# Altium footprint library Water Tank Telemeter.PcbLib: 45 footprints (part 2 of 3)
Each footprint in its own frame and in the unit in brackets; x right, y up, seen from the top. Pads: shape width x height; smd on the part's side, far side on the other; paste and mask are expansions set on the pad; w line width, h text height; cw(c..) or ccw(c..) is an arc to the next point about the centre after c.
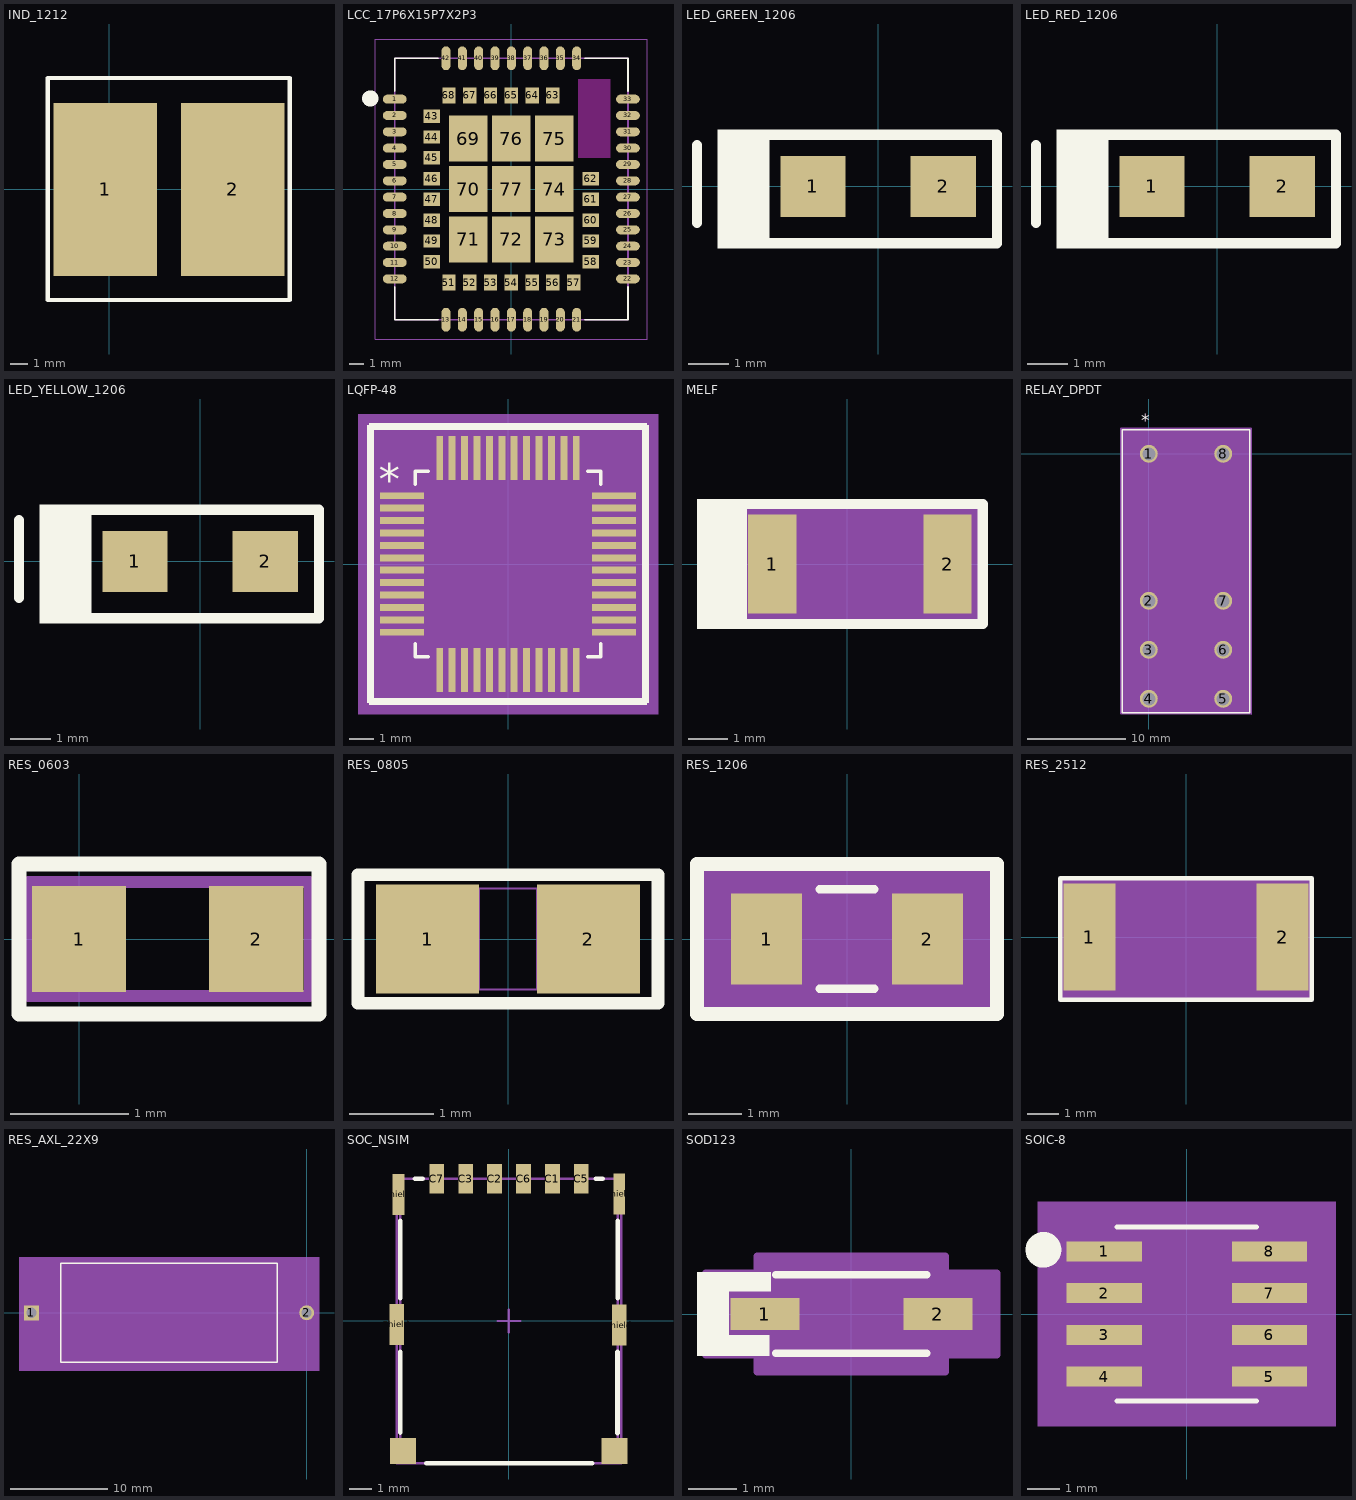
[diagram p1: the footprints below, top view; thin cyan lines are the x and y axes]

## IND_1212 [mm]
pads (2):
  rect 6x10 smd: 1(-0.229,0) 2(7.137,0)
Top Overlay:
  lines w0.254: -3.556,-6.401 10.439,-6.401 10.439,6.452 -3.556,6.452 -3.556,-6.401
3D body "69079.stp": height 7.5, standoff 0, extent -2.719,-6.25 9.781,6.25

## LCC_17P6X15P7X2P3 [mm]
pads (77):
  oval 1.6x0.6 smd: 1(-7.85,6.05) 2(-7.85,4.95) 3(-7.85,3.85) 4(-7.85,2.75) 5(-7.85,1.65) 6(-7.85,0.55) 7(-7.85,-0.55) 8(-7.85,-1.65) 9(-7.85,-2.75) 10(-7.85,-3.85) 11(-7.85,-4.95) 12(-7.85,-6.05) 22(7.85,-6.05) 23(7.85,-4.95) 24(7.85,-3.85) 25(7.85,-2.75) 26(7.85,-1.65) 27(7.85,-0.55) 28(7.85,0.55) 29(7.85,1.65) 30(7.85,2.75) 31(7.85,3.85) 32(7.85,4.95) 33(7.85,6.05)
  oval 0.6x1.6 smd: 13(-4.4,-8.8) 14(-3.3,-8.8) 15(-2.2,-8.8) 16(-1.1,-8.8) 17(0,-8.8) 18(1.1,-8.8) 19(2.2,-8.8) 20(3.3,-8.8) 21(4.4,-8.8) 34(4.4,8.8) 35(3.3,8.8) 36(2.2,8.8) 37(1.1,8.8) 38(0,8.8) 39(-1.1,8.8) 40(-2.2,8.8) 41(-3.3,8.8) 42(-4.4,8.8)
  rect 1.1x0.9 smd: 43(-5.35,4.9) 44(-5.35,3.5) 45(-5.35,2.1) 46(-5.35,0.7) 47(-5.35,-0.7) 48(-5.35,-2.1) 49(-5.35,-3.5) 50(-5.35,-4.9) 58(5.35,-4.9) 59(5.35,-3.5) 60(5.35,-2.1) 61(5.35,-0.7) 62(5.35,0.7)
  rect 0.9x1.1 smd: 51(-4.2,-6.3) 52(-2.8,-6.3) 53(-1.4,-6.3) 54(0,-6.3) 55(1.4,-6.3) 56(2.8,-6.3) 57(4.2,-6.3) 63(2.8,6.3) 64(1.4,6.3) 65(0,6.3) 66(-1.4,6.3) 67(-2.8,6.3) 68(-4.2,6.3)
  rect 2.6x3.1 smd: 69(-2.9,3.4) 70(-2.9,0) 71(-2.9,-3.4) 72(0,-3.4) 73(2.9,-3.4) 74(2.9,0) 75(2.9,3.4) 76(0,3.4) 77(0,0)
Top Overlay:
  circle w0.889: c-9.5,6.1 r0.1
  lines w0.127: -7.85,-6.6 -7.85,-8.8 -4.95,-8.8 ; -7.85,6.6 -7.85,8.8 -4.95,8.8 ; 4.95,-8.8 7.85,-8.8 7.85,-6.6 ; 4.95,8.8 7.85,8.8 7.85,6.6
Top Paste:
  drawing of 140 lines, arcs and shapes, not listed
Keep-Out Layer:
  region: 4.508,7.4 6.65,7.4 6.65,2.104 4.508,2.104
  region: 4.504,7.4 6.65,7.4 6.65,2.102 4.504,2.102
  region: 4.502,7.4 6.65,7.4 6.65,2.101 4.502,2.101
  region: 4.508,7.4 6.65,7.4 6.65,2.104 4.508,2.104
  region: 4.504,7.4 6.65,7.4 6.65,2.102 4.504,2.102
  region: 4.502,7.4 6.65,7.4 6.65,2.101 4.502,2.101
  region: 4.508,7.4 6.65,7.4 6.65,2.104 4.508,2.104
  region: 4.504,7.4 6.65,7.4 6.65,2.102 4.504,2.102
  region: 4.502,7.4 6.65,7.4 6.65,2.101 4.502,2.101
Mechanical 13:
  lines w0.127: -7.85,-8.8 -7.85,8.8 ; -7.85,-8.8 7.85,-8.8 ; -7.85,-8.8 -7.85,8.8 ; -7.85,-8.8 7.85,-8.8 ; -7.85,8.8 7.85,8.8 ; -7.85,8.8 7.85,8.8 ; 7.85,-8.8 7.85,8.8 ; 7.85,-8.8 7.85,8.8
Mechanical 15:
  lines w0.05: -9.15,-10.1 -9.15,10.1 9.15,10.1 9.15,-10.1 -9.15,-10.1
3D body "User Library-SIM868.STEP": height 2.6, standoff 0, extent -7.825,-8.786 7.875,8.814

## LED_GREEN_1206 [mm]
pads (2):
  rect 1.6x1.5 smd: 1(-1.6,0) 2(1.6,0)
Top Overlay:
  rectangle: -3.937,-1.524 -2.667,1.397
  lines w0.254: -4.445,-0.889 -4.445,1.016 ; -3.048,-1.397 -3.048,-1.142 -3.048,1.27 2.921,1.27 2.921,-1.397 -3.048,-1.397
3D body "User Library-GREEN-led_1206.STEP": height 1.1, standoff 0, extent -1.61,-0.8 1.61,0.8

## LED_RED_1206 [mm]
pads (2):
  rect 1.6x1.5 smd: 1(-1.6,0) 2(1.6,0)
Top Overlay:
  rectangle: -3.937,-1.524 -2.667,1.397
  lines w0.254: -4.445,-0.889 -4.445,1.016 ; -3.048,-1.397 2.921,-1.397 2.921,1.27 -3.048,1.27 -3.048,-1.142 -3.048,-1.397
3D body "User Library-RED-led_1206.STEP": height 1.1, standoff 0, extent -1.61,-0.8 1.61,0.8

## LED_YELLOW_1206 [mm]
pads (2):
  rect 1.6x1.5 smd: 1(-1.6,0) 2(1.6,0)
Top Overlay:
  rectangle: -3.937,-1.524 -2.667,1.397
  lines w0.254: -4.445,-0.889 -4.445,1.016 ; -3.048,-1.397 -3.048,-1.142 -3.048,1.27 2.921,1.27 2.921,-1.397 -3.048,-1.397
3D body "User Library-led-YELLOW_1206.STEP": height 1.1, standoff 0, extent -1.61,-0.8 1.61,0.8

## LQFP-48 [mil]
pads (48):
  rect 70x11 smd paste+0 mask+0: 1(-168,108.27) 2(-168,88.58) 3(-168,68.9) 4(-168,49.21) 5(-168,29.53) 6(-168,9.84) 7(-168,-9.84) 8(-168,-29.53) 9(-168,-49.21) 10(-168,-68.9) 11(-168,-88.58) 12(-168,-108.27) 25(168,-108.27) 26(168,-88.58) 27(168,-68.9) 28(168,-49.21) 29(168,-29.53) 30(168,-9.84) 31(168,9.84) 32(168,29.53) 33(168,49.21) 34(168,68.9) 35(168,88.58) 36(168,108.27)
  rect 11x70 smd paste+0 mask+0: 13(-108.27,-168) 14(-88.58,-168) 15(-68.9,-168) 16(-49.21,-168) 17(-29.53,-168) 18(-9.84,-168) 19(9.84,-168) 20(29.53,-168) 21(49.21,-168) 22(68.9,-168) 23(88.58,-168) 24(108.27,-168) 37(108.27,168) 38(88.58,168) 39(68.9,168) 40(49.21,168) 41(29.53,168) 42(9.84,168) 43(-9.84,168) 44(-29.53,168) 45(-49.21,168) 46(-68.9,168) 47(-88.58,168) 48(-108.27,168)
Top Overlay:
  region: 220,213 -220,213 -220,223 220,223
  region: 213,220 223,220 223,-220 213,-220
  region: 220,-213 -220,-213 -220,-223 220,-223
  region: -213,220 -223,220 -223,-220 -213,-220
  lines w6: -147,-126.87 -147,-147 -126.87,-147 ; -147,126.87 -147,147 -126.87,147 ; 126.87,-147 147,-147 147,-126.87 ; 126.87,147 147,147 147,126.87
  text "*" at -205,110 h50
Mechanical 5:
  region: 238,-238 -238,-238 -238,238 238,238
Mechanical 13:
  drawing of 197 lines, arcs and shapes, not listed
  text "*" at -139.5,93.11 h50
Mechanical 15:
  region: -133.77,-162 -162,-162 -162,-133.77 -223,-133.77 -223,133.77 -162,133.77 -162,162 -133.77,162 -133.77,223 133.77,223 133.77,162 162,162 162,133.77 223,133.77 223,-133.77 162,-133.77 162,-162 133.77,-162 133.77,-223 -133.77,-223
  lines w6: -223,-133.77 -223,133.77 -162,133.77 -162,162 -133.77,162 -133.77,223 133.77,223 133.77,162 162,162 162,133.77 223,133.77 223,-133.77 162,-133.77 162,-162 133.77,-162 133.77,-223 -133.77,-223 -133.77,-162 -162,-162 -162,-133.77 -223,-133.77
3D body "User Library-LQFP50P900X900X160.STEP": height 62.99, standoff 0, extent -177.17,-177.16 177.16,177.16
3D body: height 10, standoff 0, extent 0,0 10,10

## MELF [mm]
pads (2):
  rect 1.219x2.5 smd paste+0 mask+0: 1(-1.903,0) 2(2.54,0)
Top Overlay:
  rectangle: -3.81,-1.651 -2.667,1.651
  lines w0.254: -2.667,-1.524 -2.667,1.524 3.429,1.524 3.429,-1.524 -2.667,-1.524
Mechanical 5:
  region: 3.357,-1.397 -2.595,-1.397 -2.595,1.397 3.357,1.397
Mechanical 15:
  region: 3.302,-1.397 -2.54,-1.397 -2.54,1.397 3.302,1.397
3D body "User Library-MELF.STEP": height 2.47, standoff -0.03, extent -2.195,-1.25 2.805,1.25
3D body: height 0.25, standoff 0, extent 0,0 0.254,0.254

## RELAY_DPDT [mil]
pads (8):
  round 72 hole 52 mask+0: 1(0,0) 2(0,-591) 3(0,-788) 4(0,-985) 5(299,-985) 6(299,-788) 7(299,-591) 8(299,0)
Top Overlay:
  lines w6: -107.5,-1041 406.5,-1041 406.5,97 -107.5,97 -107.5,-1041
  text "*" at -30,110 h50
Mechanical 5:
  region: 410,-1040 -110,-1040 -110,100 410,100
Mechanical 13:
  lines w0: 137.5,92 ccw(c149.5,92) 161.5,92
  lines w1: -102.5,-1036 401.5,-1036 401.5,92 -102.5,92 -102.5,-1036
Mechanical 15:
  region: 411.5,-1046 -112.5,-1046 -112.5,102 411.5,102
  region: 401.5,-1036 -102.5,-1036 -102.5,92 401.5,92
  lines w6: -112.5,-1046 -112.5,102 411.5,102 411.5,-1046 -112.5,-1046
3D body "RELAY_JW2_PAN.step": height 787.09, standoff -100, extent -97.52,-1030.98 406.5,97.01
3D body: height 10, standoff 0, extent 0,0 10,10

## RES_0603 [mm]
pads (2):
  rect 0.8x0.9 smd: 1(0,0) 2(1.5,0)
Top Overlay:
  lines w0.127: -0.508,-0.635 -0.508,0.635 2.032,0.635 2.032,-0.635 -0.508,-0.635
Mechanical 13:
  lines w0.1: -0.432,-0.483 1.956,-0.483 1.956,0.483 -0.432,0.483 -0.432,-0.483
Mechanical 15:
  lines w0.05: -0.432,-0.483 1.93,-0.483 1.93,0.483 -0.432,0.483 -0.432,-0.483
3D body "CircuitWorks-RESISTOR 0603.STEP": height 0.48, standoff -0.03, extent -0.063,-0.43 1.537,0.43

## RES_0805 [mil]
pads (2):
  rect 48x51 smd paste+0 mask+0: 1(-37.5,0) 2(37.5,0)
Top Overlay:
  lines w6: -70,-30 -70,30 70,30 70,-30 -70,-30
Mechanical 13:
  lines w1: -39.5,-23.5 -39.5,23.5 ; -39.5,-23.5 39.5,-23.5 ; -39.5,-23.5 -13.5,-23.5 -13.5,23.5 -39.5,23.5 ; -39.5,-23.5 -39.5,23.5 ; -39.5,23.5 39.5,23.5 ; 39.5,-23.5 39.5,23.5 ; 39.5,-23.5 39.5,23.5 ; 39.5,-23.5 13.5,-23.5 13.5,23.5 39.5,23.5
3D body "User Library-RES0805-2.STEP": height 21.65, standoff 0, extent -39.37,-24.61 39.37,24.6
3D body: height 10, standoff 0, extent 0,0 10,10

## RES_1206 [mil]
pads (2):
  rect 52x67 smd paste+0 mask+0: 1(-59,0) 2(59,0)
Top Overlay:
  lines w6: -20.25,-36.5 20.25,-36.5 ; -20.25,36.5 20.25,36.5
  lines w10: -110,-55 110,-55 110,55 -110,55 -110,-55
Mechanical 5:
  region: 100,-48.5 -100,-48.5 -100,48.5 100,48.5
Mechanical 13:
  lines w1: -63,-31.5 -63,31.5 ; -63,-31.5 63,-31.5 ; -63,-31.5 -33,-31.5 -33,31.5 -63,31.5 ; -63,-31.5 -63,31.5 ; -63,31.5 63,31.5 ; 63,-31.5 63,31.5 ; 63,-31.5 63,31.5 ; 63,-31.5 33,-31.5 33,31.5 63,31.5
Mechanical 15:
  region: 105,-53.5 -105,-53.5 -105,53.5 105,53.5
  lines w6: -105,-53.5 105,-53.5 105,53.5 -105,53.5 -105,-53.5
3D body: height 10, standoff 0, extent 0,0 10,10
3D body "User Library-1206 SMD Resistor.STEP": height 39.45, standoff 0, extent -57.99,-31.5 67.99,31.5

## RES_2512 [mil]
pads (2):
  rect 66x136 smd paste+0 mask+0: 1(-123,0) 2(123,0)
Top Overlay:
  lines w6: -160,-80 -160,75 160,75 160,-80 -160,-80
Mechanical 13:
  lines w1: -128,-68 -128,68 ; -128,-68 128,-68 ; -128,-68 -90,-68 -90,68 -128,68 ; -128,-68 -128,68 ; -128,68 128,68 ; 128,-68 128,68 ; 128,-68 128,68 ; 128,-68 90,-68 90,68 128,68
Mechanical 15:
  region: 160,-78 -160,-78 -160,75 160,75
  lines w6: -146,-75 146,-75 146,75 -146,75 -146,-75
3D body: height 10, standoff 0, extent 0,0 10,10
3D body "STA_RMCF2512_STP-M.step": height 27.99, standoff 0, extent -127.99,-67.99 128,68

## RES_AXL_22X9 [mil]
pads (2):
  rect 61x61 hole 41: 1(-1120,0)
  round 61 hole 41: 2(0,0)
Top Overlay:
  lines w6: -1000,-202 -1000,202 -120,202 -120,-202 -1000,-202
Mechanical 5:
  region: 50,-235 -1170,-235 -1170,225 50,225
Mechanical 13:
  lines w1: -1120,0 -995,0 ; -125,0 0,0 ; -995,-197 -995,197 -125,197 -125,-197 -995,-197
Mechanical 15:
  region: -1005,-40.5 -1160.5,-40.5 -1160.5,40.5 -1005,40.5 -1005,207 -115,207 -115,40.5 40.5,40.5 40.5,-40.5 -115,-40.5 -115,-207 -1005,-207
  lines w6: -1160.5,-40.5 -1005,-40.5 -1005,-207 -115,-207 -115,-40.5 40.5,-40.5 40.5,40.5 -115,40.5 -115,207 -1005,207 -1005,40.5 -1160.5,40.5 -1160.5,-40.5
3D body: height 10, standoff 0, extent 0,0 10,10
3D body "User Library-Cement Fixed Resistors 5W 100R PCB Horizontal.STEP": height 354.33, standoff -141.73, extent -1124.76,-196.85 4.77,196.85

## SOC_NSIM [mm]
pads (12):
  rect 0.65x1.3 smd: C1(1.915,6.25) C2(-0.625,6.25) C3(-1.895,6.25) C5(3.185,6.25) C6(0.645,6.25) C7(-3.165,6.25)
  rect 0.635x1.8 smd: Shield(-4.926,-0.152) Shield(4.851,-0.178)
  rect 0.508x1.8 smd: Shield(-4.851,5.563) Shield(4.851,5.588)
  rect 1.143x1.143 smd: Shield(-4.648,-5.715) Shield(4.648,-5.715)
Top Overlay:
  lines w0.2: -4.775,-4.902 -4.775,-1.35 ; -4.775,1 -4.775,4.4 ; -4.125,6.25 -3.775,6.25 ; -3.625,-6.25 3.675,-6.25 ; 3.825,6.25 4.125,6.25 ; 4.775,-4.928 4.775,-1.35 ; 4.785,1 4.785,4.4
Mechanical 11:
  lines w0.1: -4.775,-6.25 -4.775,6.25 4.785,6.25 4.785,-6.25 -4.775,-6.25
Mechanical 13:
  lines w0.1: -4.926,-6.25 -4.926,6.25 4.936,6.25 4.935,-6.25 -4.926,-6.25
Mechanical 15:
  lines w0.1: -0.5,0 0.5,0 ; 0,-0.5 0,0.5
3D body "693043020611.stp": height 1.2, standoff -0.01, extent -4.926,-6.25 4.936,6.25

## SOD123 [mm]
pads (2):
  rect 1.416x0.652 smd paste+0 mask+0: 1(-1.776,0) 2(1.776,0)
Top Overlay:
  rectangle: -2.515,-0.865 -1.676,-0.432
  rectangle: -2.515,0.457 -1.651,0.864
  rectangle: -3.168,-0.865 -2.515,0.864
  lines w0.152: -1.552,-0.802 1.552,-0.802 ; -1.552,0.802 1.552,0.802
Mechanical 5:
  region: 2.674,-0.865 -2.674,-0.865 -2.674,0.865 2.674,0.865
Mechanical 13:
  lines w0.025: -1.425,-0.337 -1.087,-0.675 ; -1.425,0.337 -1.087,0.675 ; -1.925,-0.275 -1.925,0.275 -1.425,0.275 -1.425,-0.275 -1.925,-0.275 ; -1.425,-0.675 1.425,-0.675 1.425,0.675 -1.425,0.675 -1.425,-0.675 ; 1.425,-0.275 1.425,0.275 1.925,0.275 1.925,-0.275 1.425,-0.275
  text "*" at -1.488,-0.635 h1.27
Mechanical 15:
  region: -1.933,-0.834 -2.992,-0.834 -2.992,0.834 -1.933,0.834 -1.933,1.183 1.933,1.183 1.933,0.834 2.992,0.834 2.992,-0.834 1.933,-0.834 1.933,-1.183 -1.933,-1.183
  lines w0.152: -2.992,-0.834 -2.992,0.834 -1.933,0.834 -1.933,1.183 1.933,1.183 1.933,0.834 2.992,0.834 2.992,-0.834 1.933,-0.834 1.933,-1.183 -1.933,-1.183 -1.933,-0.834 -2.992,-0.834
3D body "User Library-SOD-123_DiodesInc.STEP": height 1.43, standoff -0.02, extent -1.9,-0.862 1.95,0.838
3D body: height 0.25, standoff 0, extent 0,0 0.254,0.254

## SOIC-8 [mil]
pads (8):
  rect 90x24.08 smd paste+0 mask+0: 1(-99.05,75) 2(-99.05,25) 3(-99.05,-25) 4(-99.05,-75) 5(99.05,-75) 6(99.05,-25) 7(99.05,25) 8(99.05,75)
Top Overlay:
  circle w25: c-172,77 r8.94
  lines w6: -83.54,-104.41 83.54,-104.41 ; -83.54,104.41 83.54,104.41
Mechanical 5:
  region: 179.05,-134.41 -179.05,-134.41 -179.05,134.41 179.05,134.41
Mechanical 13:
  lines w0: -12,99.41 ccw(c0,99.41) 12,99.41
  lines w1: -122.05,-85.04 -78.54,-85.04 -78.54,-64.96 -122.05,-64.96 -122.05,-85.04 ; -122.05,-35.04 -78.54,-35.04 -78.54,-14.96 -122.05,-14.96 -122.05,-35.04 ; -122.05,14.96 -78.54,14.96 -78.54,35.04 -122.05,35.04 -122.05,14.96 ; -122.05,64.96 -78.54,64.96 -78.54,85.04 -122.05,85.04 -122.05,64.96 ; -78.54,-99.41 -78.54,99.41 78.54,99.41 78.54,-99.41 -78.54,-99.41 ; 78.54,-85.04 122.05,-85.04 122.05,-64.96 78.54,-64.96 78.54,-85.04 ; 78.54,-35.04 122.05,-35.04 122.05,-14.96 78.54,-14.96 78.54,-35.04 ; 78.54,14.96 122.05,14.96 122.05,35.04 78.54,35.04 78.54,14.96 ; 78.54,64.96 122.05,64.96 122.05,85.04 78.54,85.04 78.54,64.96
Mechanical 15:
  region: -98.54,-107.04 -164.05,-107.04 -164.05,107.04 -98.54,107.04 -98.54,119.41 98.54,119.41 98.54,107.04 164.05,107.04 164.05,-107.04 98.54,-107.04 98.54,-119.41 -98.54,-119.41
  lines w6: -164.05,-107.04 -98.54,-107.04 -98.54,-119.41 98.54,-119.41 98.54,-107.04 164.05,-107.04 164.05,107.04 98.54,107.04 98.54,119.41 -98.54,119.41 -98.54,107.04 -164.05,107.04 -164.05,-107.04
3D body "User Library-so8-3.STEP": height 66.93, standoff 0, extent -118.1,-96.45 118.12,96.47
3D body: height 10, standoff 0, extent 0,0 10,10